# Altium footprint library JEDEC.PcbLib: 40 footprints (part 3 of 3)
Each footprint in its own frame and in the unit in brackets; x right, y up, seen from the top. Pads: shape width x height; smd on the part's side, far side on the other; paste and mask are expansions set on the pad; w line width, h text height; cw(c..) or ccw(c..) is an arc to the next point about the centre after c.
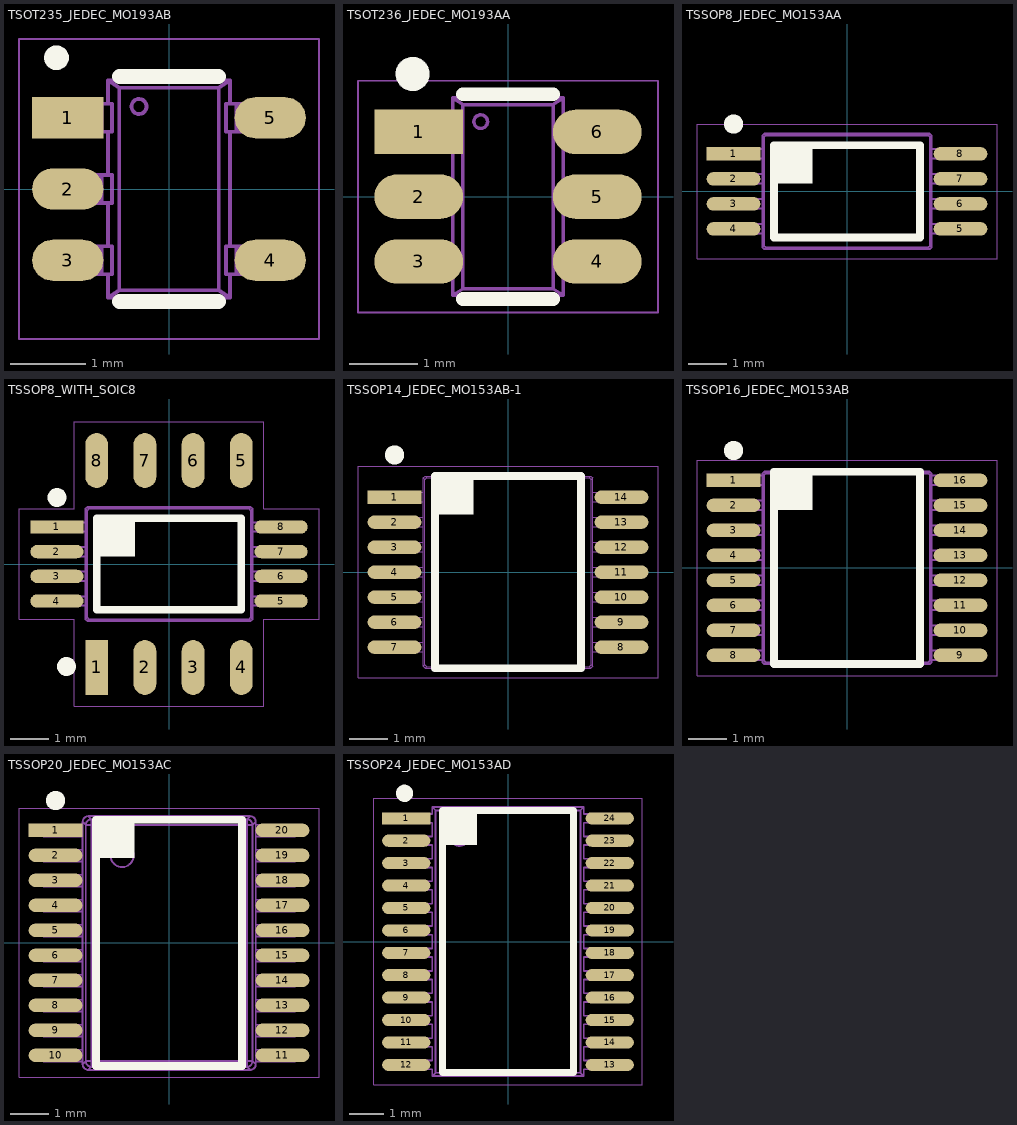
[diagram p2: the footprints below, top view; thin cyan lines are the x and y axes]

## TSOT235_JEDEC_MO193AB [mm] "TSOT23, 5-Leads, Body 1.60x2.90mm, Pitch 0.95mm"
height 0.9
pads (5):
  rect 0.95x0.55 smd paste+0 mask+0.05: 1(-1.35,0.95)
  oval 0.95x0.55 smd paste+0 mask+0.05: 2(-1.35,0) 3(-1.35,-0.95) 4(1.35,-0.95) 5(1.35,0.95)
Top Overlay:
  circle w0.17: c-1.5,1.75 r0.08
  lines w0.2: -0.663,-1.5 0.663,-1.5 ; -0.663,1.5 0.663,1.5
Top Courtyard:
  lines w0.025: -2,-2 -2,2 2,2 2,-2 -2,-2
Top Assembly:
  circle w0.05: c-0.4,1.1 r0.1
  lines w0.05: -0.813,-1.138 -0.813,-1.45 ; -0.813,-0.763 -0.813,-0.188 ; -0.813,0.187 -0.813,0.762 ; -0.813,1.137 -0.813,1.45 ; 0.813,-1.138 0.813,-1.45 ; 0.813,-0.763 0.813,0.762 ; 0.813,1.137 0.813,1.45 ; -1.232,-1.138 -1.213,-1.138 ; -1.232,-1.138 -1.399,-1.138 -1.399,-0.763 -1.232,-0.763 ; -1.232,-1.138 -1.232,-0.763 ; -1.232,-0.763 -1.213,-0.763 ; -1.232,-0.188 -1.213,-0.188 ; -1.232,-0.188 -1.399,-0.188 -1.399,0.187 -1.232,0.187 ; -1.232,-0.188 -1.232,0.187 ; -1.232,0.187 -1.213,0.187 ; -1.232,0.762 -1.213,0.762 ; -1.232,0.762 -1.399,0.762 -1.399,1.137 -1.232,1.137 ; -1.232,0.762 -1.232,1.137 ; -1.232,1.137 -1.213,1.137 ; -1.213,-1.138 -1.058,-1.138 ; -1.213,-1.138 -1.213,-0.763 ; -1.213,-0.763 -1.058,-0.763 ; -1.213,-0.188 -1.058,-0.188 ; -1.213,-0.188 -1.213,0.187 ; -1.213,0.187 -1.058,0.187 ; -1.213,0.762 -1.058,0.762 ; -1.213,0.762 -1.213,1.137 ; -1.213,1.137 -1.058,1.137 ; -1.058,-1.138 -0.898,-1.138 ; -1.058,-1.138 -1.058,-0.763 ; -1.058,-0.763 -0.898,-0.763 ; -1.058,-0.188 -0.898,-0.188 ; -1.058,-0.188 -1.058,0.187 ; -1.058,0.187 -0.898,0.187 ; -1.058,0.762 -0.898,0.762 ; -1.058,0.762 -1.058,1.137 ; -1.058,1.137 -0.898,1.137 ; -0.898,-1.138 -0.76,-1.138 -0.76,-0.763 -0.898,-0.763 ; -0.898,-1.138 -0.898,-0.763 ; -0.898,-0.188 -0.76,-0.188 -0.76,0.187 -0.898,0.187 ; -0.898,-0.188 -0.898,0.187 ; -0.898,0.762 -0.76,0.762 -0.76,1.137 -0.898,1.137 ; -0.898,0.762 -0.898,1.137 ; -0.813,-1.45 -0.663,-1.35 ; -0.813,-1.45 0.813,-1.45 ; -0.813,1.45 -0.663,1.35 ; -0.813,1.45 0.813,1.45 ; -0.663,-1.35 -0.663,1.35 ; -0.663,-1.35 0.663,-1.35 ; -0.663,1.35 0.663,1.35 ; 0.663,-1.35 0.813,-1.45 ; 0.663,-1.35 0.663,1.35 ; 0.663,1.35 0.813,1.45 ; 0.898,-1.138 0.76,-1.138 0.76,-0.763 0.898,-0.763 ; 0.898,-1.138 1.058,-1.138 ; 0.898,-1.138 0.898,-0.763 ; 0.898,-0.763 1.058,-0.763 ; 0.898,0.762 0.76,0.762 0.76,1.137 0.898,1.137 ; 0.898,0.762 1.058,0.762 ; 0.898,0.762 0.898,1.137 ; 0.898,1.137 1.058,1.137 ; 1.058,-1.138 1.213,-1.138 ; 1.058,-1.138 1.058,-0.763 ; 1.058,-0.763 1.213,-0.763 ; 1.058,0.762 1.213,0.762 ; 1.058,0.762 1.058,1.137 ; 1.058,1.137 1.213,1.137 ; 1.213,-1.138 1.232,-1.138 ; 1.213,-1.138 1.213,-0.763 ; 1.213,-0.763 1.232,-0.763 ; 1.213,0.762 1.232,0.762 ; 1.213,0.762 1.213,1.137 ; 1.213,1.137 1.232,1.137 ; 1.232,-1.138 1.399,-1.138 1.399,-0.763 1.232,-0.763 ; 1.232,-1.138 1.232,-0.763 ; 1.232,0.762 1.399,0.762 1.399,1.137 1.232,1.137 ; 1.232,0.762 1.232,1.137
  text ".Designator" at 0.271,-2.704 h1.2
3D body "TSOT235_JEDEC_MO193AB.x_t": height 0.95, standoff 0, extent -1.4,-1.45 1.4,1.45

## TSOT236_JEDEC_MO193AA [mm] "TSOT23, 6-Leads, Body 1.60x2.90mm, Pitch 0.95mm"
height 0.9
pads (6):
  rect 1.3x0.65 smd paste+0 mask+0.05: 1(-1.31,0.95)
  oval 1.3x0.65 smd paste+0 mask+0.05: 2(-1.31,0) 3(-1.31,-0.95) 4(1.31,-0.95) 5(1.31,0) 6(1.31,0.95)
Top Overlay:
  circle w0.25: c-1.4,1.8 r0.125
  lines w0.2: -0.663,-1.5 0.663,-1.5 ; -0.663,1.5 0.663,1.5
Top Courtyard:
  lines w0.025: -2.2,-1.7 2.2,-1.7 2.2,1.7 -2.2,1.7 -2.2,-1.7
Top Assembly:
  circle w0.05: c-0.4,1.1 r0.1
  lines w0.05: -0.813,-1.138 -0.813,-1.45 ; -0.813,-0.763 -0.813,-0.188 ; -0.813,0.187 -0.813,0.762 ; -0.813,1.137 -0.813,1.45 ; 0.813,-1.138 0.813,-1.45 ; 0.813,-0.763 0.813,-0.188 ; 0.813,0.187 0.813,0.762 ; 0.813,1.137 0.813,1.45 ; -1.232,-1.138 -1.232,-0.763 ; -1.232,-1.138 -1.399,-1.138 -1.399,-0.763 -1.232,-0.763 ; -1.232,-1.138 -1.213,-1.138 ; -1.232,-0.763 -1.213,-0.763 ; -1.232,-0.188 -1.232,0.187 ; -1.232,-0.188 -1.399,-0.188 -1.399,0.187 -1.232,0.187 ; -1.232,-0.188 -1.213,-0.188 ; -1.232,0.187 -1.213,0.187 ; -1.232,0.762 -1.232,1.137 ; -1.232,0.762 -1.399,0.762 -1.399,1.137 -1.232,1.137 ; -1.232,0.762 -1.213,0.762 ; -1.232,1.137 -1.213,1.137 ; -1.213,-1.138 -1.213,-0.763 ; -1.213,-1.138 -1.058,-1.138 ; -1.213,-0.763 -1.058,-0.763 ; -1.213,-0.188 -1.213,0.187 ; -1.213,-0.188 -1.058,-0.188 ; -1.213,0.187 -1.058,0.187 ; -1.213,0.762 -1.213,1.137 ; -1.213,0.762 -1.058,0.762 ; -1.213,1.137 -1.058,1.137 ; -1.058,-1.138 -1.058,-0.763 ; -1.058,-1.138 -0.898,-1.138 ; -1.058,-0.763 -0.898,-0.763 ; -1.058,-0.188 -1.058,0.187 ; -1.058,-0.188 -0.898,-0.188 ; -1.058,0.187 -0.898,0.187 ; -1.058,0.762 -1.058,1.137 ; -1.058,0.762 -0.898,0.762 ; -1.058,1.137 -0.898,1.137 ; -0.898,-1.138 -0.898,-0.763 ; -0.898,-1.138 -0.76,-1.138 -0.76,-0.763 -0.898,-0.763 ; -0.898,-0.188 -0.898,0.187 ; -0.898,-0.188 -0.76,-0.188 -0.76,0.187 -0.898,0.187 ; -0.898,0.762 -0.898,1.137 ; -0.898,0.762 -0.76,0.762 -0.76,1.137 -0.898,1.137 ; -0.813,-1.45 0.813,-1.45 ; -0.813,-1.45 -0.663,-1.35 ; -0.813,1.45 0.813,1.45 ; -0.813,1.45 -0.663,1.35 ; -0.663,-1.35 0.663,-1.35 ; -0.663,-1.35 -0.663,1.35 ; -0.663,1.35 0.663,1.35 ; 0.663,-1.35 0.663,1.35 ; 0.663,-1.35 0.813,-1.45 ; 0.663,1.35 0.813,1.45 ; 0.898,-1.138 0.76,-1.138 0.76,-0.763 0.898,-0.763 ; 0.898,-1.138 1.058,-1.138 ; 0.898,-1.138 0.898,-0.763 ; 0.898,-0.763 1.058,-0.763 ; 0.898,-0.188 0.76,-0.188 0.76,0.187 0.898,0.187 ; 0.898,-0.188 1.058,-0.188 ; 0.898,-0.188 0.898,0.187 ; 0.898,0.187 1.058,0.187 ; 0.898,0.762 0.76,0.762 0.76,1.137 0.898,1.137 ; 0.898,0.762 1.058,0.762 ; 0.898,0.762 0.898,1.137 ; 0.898,1.137 1.058,1.137 ; 1.058,-1.138 1.213,-1.138 ; 1.058,-1.138 1.058,-0.763 ; 1.058,-0.763 1.213,-0.763 ; 1.058,-0.188 1.213,-0.188 ; 1.058,-0.188 1.058,0.187 ; 1.058,0.187 1.213,0.187 ; 1.058,0.762 1.213,0.762 ; 1.058,0.762 1.058,1.137 ; 1.058,1.137 1.213,1.137 ; 1.213,-1.138 1.232,-1.138 ; 1.213,-1.138 1.213,-0.763 ; 1.213,-0.763 1.232,-0.763 ; 1.213,-0.188 1.232,-0.188 ; 1.213,-0.188 1.213,0.187 ; 1.213,0.187 1.232,0.187 ; 1.213,0.762 1.232,0.762 ; 1.213,0.762 1.213,1.137 ; 1.213,1.137 1.232,1.137 ; 1.232,-1.138 1.399,-1.138 1.399,-0.763 1.232,-0.763 ; 1.232,-1.138 1.232,-0.763 ; 1.232,-0.188 1.399,-0.188 1.399,0.187 1.232,0.187 ; 1.232,-0.188 1.232,0.187 ; 1.232,0.762 1.399,0.762 1.399,1.137 1.232,1.137 ; 1.232,0.762 1.232,1.137
  text ".Designator" at 0.283,-2.815 h1.25
3D body "TSOT236_JEDEC_MO193AA.x_t": height 0.95, standoff 0, extent -1.4,-1.45 1.4,1.45

## TSSOP8_JEDEC_MO153AA [mm] "TSSOP, 8-Leads, Body 3.0x4.40mm, Pitch 0.65mm"
height 1.2
pads (8):
  rect 1.4x0.35 smd paste+0 mask+0.05: 1(-2.95,0.975)
  oval 1.4x0.35 smd paste+0 mask+0.05: 2(-2.95,0.325) 3(-2.95,-0.325) 4(-2.95,-0.975) 5(2.95,-0.975) 6(2.95,-0.325) 7(2.95,0.325) 8(2.95,0.975)
Top Overlay:
  circle w0.25: c-2.95,1.75 r0.125
  region: -0.9,1.2 -1.9,1.2 -1.9,0.2 -0.9,0.2
  lines w0.2: -1.9,-1.2 -1.9,1.2 1.9,1.2 1.9,-1.2 -1.9,-1.2
Top Courtyard:
  lines w0.025: -3.9,-1.75 -3.9,1.75 3.9,1.75 3.9,-1.75 -3.9,-1.75
Top Assembly:
  circle w0.05: c-1.7,1 r0.25
  lines w0.05: -2.773,-1.098 -2.773,-0.853 ; -2.773,-0.447 -2.773,-0.202 ; -2.773,0.202 -2.773,0.447 ; -2.773,0.853 -2.773,1.098 ; -2.706,-1.098 -2.706,-0.853 ; -2.706,-0.447 -2.706,-0.202 ; -2.706,0.202 -2.706,0.447 ; -2.706,0.853 -2.706,1.098 ; -2.605,-1.098 -2.605,-0.853 ; -2.605,-0.447 -2.605,-0.202 ; -2.605,0.202 -2.605,0.447 ; -2.605,0.853 -2.605,1.098 ; -2.46,-1.098 -2.46,-0.853 ; -2.46,-0.447 -2.46,-0.202 ; -2.46,0.202 -2.46,0.447 ; -2.46,0.853 -2.46,1.098 ; -2.2,-1.449 -2.158,-1.408 ; -2.2,-1.098 -3.2,-1.098 -3.2,-0.853 -2.2,-0.853 ; -2.2,-0.447 -3.2,-0.447 -3.2,-0.202 -2.2,-0.202 ; -2.2,0.202 -3.2,0.202 -3.2,0.447 -2.2,0.447 ; -2.2,0.853 -3.2,0.853 -3.2,1.098 -2.2,1.098 ; -2.149,1.5 -2.108,1.458 ; 2.149,1.5 2.108,1.458 ; 2.2,-1.449 2.158,-1.408 ; 2.2,-1.098 3.2,-1.098 3.2,-0.853 2.2,-0.853 ; 2.2,-0.447 3.2,-0.447 3.2,-0.202 2.2,-0.202 ; 2.2,0.202 3.2,0.202 3.2,0.447 2.2,0.447 ; 2.2,0.853 3.2,0.853 3.2,1.098 2.2,1.098 ; 2.46,-1.098 2.46,-0.853 ; 2.46,-0.447 2.46,-0.202 ; 2.46,0.202 2.46,0.447 ; 2.46,0.853 2.46,1.098 ; 2.605,-1.098 2.605,-0.853 ; 2.605,-0.447 2.605,-0.202 ; 2.605,0.202 2.605,0.447 ; 2.605,0.853 2.605,1.098 ; 2.706,-1.098 2.706,-0.853 ; 2.706,-0.447 2.706,-0.202 ; 2.706,0.202 2.706,0.447 ; 2.706,0.853 2.706,1.098 ; 2.773,-1.098 2.773,-0.853 ; 2.773,-0.447 2.773,-0.202 ; 2.773,0.202 2.773,0.447 ; 2.773,0.853 2.773,1.098 ; -2.2,1.45 -2.158,1.408 ; -2.2,1.45 -2.2,-1.45 -2.15,-1.5 ; -2.2,1.45 -2.15,1.5 2.15,1.5 2.2,1.45 ; -2.158,-1.408 -2.108,-1.458 ; -2.158,-1.408 -2.158,1.408 ; -2.158,1.408 -2.108,1.458 ; -2.15,-1.5 -2.108,-1.458 ; -2.15,-1.5 2.15,-1.5 ; -2.108,-1.458 2.108,-1.458 ; -2.108,1.458 2.108,1.458 ; 2.108,-1.458 2.158,-1.408 ; 2.108,-1.458 2.15,-1.5 ; 2.108,1.458 2.158,1.408 ; 2.15,-1.5 2.2,-1.45 2.2,1.45 ; 2.158,-1.408 2.158,1.408 ; 2.158,1.408 2.2,1.45
  text ".Designator" at -4.511,-0.453 h2
3D body "TSSOP8_JEDEC_MO153.x_t": height 1.2, standoff 0, extent -3.2,-1.5 3.2,1.5

## TSSOP8_WITH_SOIC8 [mm] "TSSOP, 8-Leads, Body 3.0x4.40mm, Pitch 0.65mm"
height 1.2
pads (16):
  rect 1.4x0.35 smd paste+0 mask+0.05: 1(-2.95,0.975)
  rect 0.6x1.45 smd paste+0 mask+0.05: 1(-1.905,-2.725)
  oval 1.4x0.35 smd paste+0 mask+0.05: 2(-2.95,0.325) 3(-2.95,-0.325) 4(-2.95,-0.975) 5(2.95,-0.975) 6(2.95,-0.325) 7(2.95,0.325) 8(2.95,0.975)
  oval 0.6x1.45 smd paste+0 mask+0.05: 2(-0.635,-2.725) 3(0.635,-2.725) 4(1.905,-2.725) 5(1.905,2.725) 6(0.635,2.725) 7(-0.635,2.725) 8(-1.905,2.725)
Top Overlay:
  circle w0.25: c-2.95,1.75 r0.125
  circle w0.25: c-2.7,-2.7 r0.125
  region: -0.9,1.2 -1.9,1.2 -1.9,0.2 -0.9,0.2
  lines w0.2: -1.9,-1.2 1.9,-1.2 1.9,1.2 -1.9,1.2 -1.9,-1.2
Top Courtyard:
  lines w0.025: -3.95,-1.45 -3.95,1.45 -2.5,1.45 -2.5,3.75 2.5,3.75 2.5,1.45 3.95,1.45 3.95,-1.45 2.5,-1.45 2.5,-3.75 -2.5,-3.75 -2.5,-1.45 -3.95,-1.45
Top Assembly:
  circle w0.05: c-1.7,1 r0.25
  lines w0.05: -2.773,-1.098 -2.773,-0.853 ; -2.773,-0.447 -2.773,-0.202 ; -2.773,0.202 -2.773,0.447 ; -2.773,0.853 -2.773,1.098 ; -2.706,-1.098 -2.706,-0.853 ; -2.706,-0.447 -2.706,-0.202 ; -2.706,0.202 -2.706,0.447 ; -2.706,0.853 -2.706,1.098 ; -2.605,-1.098 -2.605,-0.853 ; -2.605,-0.447 -2.605,-0.202 ; -2.605,0.202 -2.605,0.447 ; -2.605,0.853 -2.605,1.098 ; -2.46,-1.098 -2.46,-0.853 ; -2.46,-0.447 -2.46,-0.202 ; -2.46,0.202 -2.46,0.447 ; -2.46,0.853 -2.46,1.098 ; -2.2,-1.449 -2.158,-1.408 ; -2.2,-1.098 -3.2,-1.098 -3.2,-0.853 -2.2,-0.853 ; -2.2,-0.447 -3.2,-0.447 -3.2,-0.202 -2.2,-0.202 ; -2.2,0.202 -3.2,0.202 -3.2,0.447 -2.2,0.447 ; -2.2,0.853 -3.2,0.853 -3.2,1.098 -2.2,1.098 ; -2.149,1.5 -2.108,1.458 ; 2.149,1.5 2.108,1.458 ; 2.2,-1.449 2.158,-1.408 ; 2.2,-1.098 3.2,-1.098 3.2,-0.853 2.2,-0.853 ; 2.2,-0.447 3.2,-0.447 3.2,-0.202 2.2,-0.202 ; 2.2,0.202 3.2,0.202 3.2,0.447 2.2,0.447 ; 2.2,0.853 3.2,0.853 3.2,1.098 2.2,1.098 ; 2.46,-1.098 2.46,-0.853 ; 2.46,-0.447 2.46,-0.202 ; 2.46,0.202 2.46,0.447 ; 2.46,0.853 2.46,1.098 ; 2.605,-1.098 2.605,-0.853 ; 2.605,-0.447 2.605,-0.202 ; 2.605,0.202 2.605,0.447 ; 2.605,0.853 2.605,1.098 ; 2.706,-1.098 2.706,-0.853 ; 2.706,-0.447 2.706,-0.202 ; 2.706,0.202 2.706,0.447 ; 2.706,0.853 2.706,1.098 ; 2.773,-1.098 2.773,-0.853 ; 2.773,-0.447 2.773,-0.202 ; 2.773,0.202 2.773,0.447 ; 2.773,0.853 2.773,1.098 ; -2.2,1.45 -2.15,1.5 2.15,1.5 2.2,1.45 ; -2.2,1.45 -2.2,-1.45 -2.15,-1.5 ; -2.2,1.45 -2.158,1.408 ; -2.158,-1.408 -2.158,1.408 ; -2.158,-1.408 -2.108,-1.458 ; -2.158,1.408 -2.108,1.458 ; -2.15,-1.5 2.15,-1.5 ; -2.15,-1.5 -2.108,-1.458 ; -2.108,-1.458 2.108,-1.458 ; -2.108,1.458 2.108,1.458 ; 2.108,-1.458 2.15,-1.5 ; 2.108,-1.458 2.158,-1.408 ; 2.108,1.458 2.158,1.408 ; 2.15,-1.5 2.2,-1.45 2.2,1.45 ; 2.158,-1.408 2.158,1.408 ; 2.158,1.408 2.2,1.45
  text ".Designator" at -4.511,-0.453 h2
3D body "TSSOP8_JEDEC_MO153.x_t": height 1.2, standoff 0, extent -3.2,-1.5 3.2,1.5

## TSSOP14_JEDEC_MO153AB-1 [mm] "TSSOP, 14-Leads, Body 5.0x4.40mm, Pitch 0.65mm"
height 1.2
pads (14):
  rect 1.4x0.35 smd paste+0 mask+0.05: 1(-2.95,1.95)
  oval 1.4x0.35 smd paste+0 mask+0.05: 2(-2.95,1.3) 3(-2.95,0.65) 4(-2.95,0) 5(-2.95,-0.65) 6(-2.95,-1.3) 7(-2.95,-1.95) 8(2.95,-1.95) 9(2.95,-1.3) 10(2.95,-0.65) 11(2.95,0) 12(2.95,0.65) 13(2.95,1.3) 14(2.95,1.95)
Top Overlay:
  circle w0.25: c-2.95,3.05 r0.125
  region: -0.9,2.5 -1.9,2.5 -1.9,1.5 -0.9,1.5
  lines w0.2: -1.9,-2.5 -1.9,2.5 1.9,2.5 1.9,-2.5 -1.9,-2.5
Top Courtyard:
  lines w0.025: -3.9,-2.75 3.9,-2.75 3.9,2.75 -3.9,2.75 -3.9,-2.75
Top Assembly:
  circle w0.013: c-1.7,2 r0.25
  lines w0.013: -2.773,-2.073 -2.773,-1.828 ; -2.773,-1.423 -2.773,-1.178 ; -2.773,-0.773 -2.773,-0.528 ; -2.773,-0.123 -2.773,0.122 ; -2.773,0.527 -2.773,0.772 ; -2.773,1.177 -2.773,1.422 ; -2.773,1.827 -2.773,2.072 ; -2.706,-2.073 -2.706,-1.828 ; -2.706,-1.423 -2.706,-1.178 ; -2.706,-0.773 -2.706,-0.528 ; -2.706,-0.123 -2.706,0.122 ; -2.706,0.527 -2.706,0.772 ; -2.706,1.177 -2.706,1.422 ; -2.706,1.827 -2.706,2.072 ; -2.605,-2.073 -2.605,-1.828 ; -2.605,-1.423 -2.605,-1.178 ; -2.605,-0.773 -2.605,-0.528 ; -2.605,-0.123 -2.605,0.122 ; -2.605,0.527 -2.605,0.772 ; -2.605,1.177 -2.605,1.422 ; -2.605,1.827 -2.605,2.072 ; -2.46,-2.073 -2.46,-1.828 ; -2.46,-1.423 -2.46,-1.178 ; -2.46,-0.773 -2.46,-0.528 ; -2.46,-0.123 -2.46,0.122 ; -2.46,0.527 -2.46,0.772 ; -2.46,1.177 -2.46,1.422 ; -2.46,1.827 -2.46,2.072 ; -2.2,-2.073 -3.2,-2.073 -3.2,-1.828 -2.2,-1.828 ; -2.2,-1.423 -3.2,-1.423 -3.2,-1.178 -2.2,-1.178 ; -2.2,-0.773 -3.2,-0.773 -3.2,-0.528 -2.2,-0.528 ; -2.2,-0.123 -3.2,-0.123 -3.2,0.122 -2.2,0.122 ; -2.2,0.527 -3.2,0.527 -3.2,0.772 -2.2,0.772 ; -2.2,1.177 -3.2,1.177 -3.2,1.422 -2.2,1.422 ; -2.2,1.827 -3.2,1.827 -3.2,2.072 -2.2,2.072 ; -2.149,2.5 -2.108,2.458 ; 2.149,2.5 2.108,2.458 ; 2.2,-2.073 3.2,-2.073 3.2,-1.828 2.2,-1.828 ; 2.2,-1.423 3.2,-1.423 3.2,-1.178 2.2,-1.178 ; 2.2,-0.773 3.2,-0.773 3.2,-0.528 2.2,-0.528 ; 2.2,-0.123 3.2,-0.123 3.2,0.122 2.2,0.122 ; 2.2,0.527 3.2,0.527 3.2,0.772 2.2,0.772 ; 2.2,1.177 3.2,1.177 3.2,1.422 2.2,1.422 ; 2.2,1.827 3.2,1.827 3.2,2.072 2.2,2.072 ; 2.46,-2.073 2.46,-1.828 ; 2.46,-1.423 2.46,-1.178 ; 2.46,-0.773 2.46,-0.528 ; 2.46,-0.123 2.46,0.122 ; 2.46,0.527 2.46,0.772 ; 2.46,1.177 2.46,1.422 ; 2.46,1.827 2.46,2.072 ; 2.605,-2.073 2.605,-1.828 ; 2.605,-1.423 2.605,-1.178 ; 2.605,-0.773 2.605,-0.528 ; 2.605,-0.123 2.605,0.122 ; 2.605,0.527 2.605,0.772 ; 2.605,1.177 2.605,1.422 ; 2.605,1.827 2.605,2.072 ; 2.706,-2.073 2.706,-1.828 ; 2.706,-1.423 2.706,-1.178 ; 2.706,-0.773 2.706,-0.528 ; 2.706,-0.123 2.706,0.122 ; 2.706,0.527 2.706,0.772 ; 2.706,1.177 2.706,1.422 ; 2.706,1.827 2.706,2.072 ; 2.773,-2.073 2.773,-1.828 ; 2.773,-1.423 2.773,-1.178 ; 2.773,-0.773 2.773,-0.528 ; 2.773,-0.123 2.773,0.122 ; 2.773,0.527 2.773,0.772 ; 2.773,1.177 2.773,1.422 ; 2.773,1.827 2.773,2.072 ; -2.2,-2.45 -2.15,-2.5 ; -2.2,-2.449 -2.158,-2.408 ; -2.2,-2.45 -2.2,2.45 ; -2.2,2.45 -2.15,2.5 2.15,2.5 2.2,2.45 ; -2.2,2.45 -2.158,2.408 ; -2.158,-2.408 -2.158,2.408 ; -2.158,-2.408 -2.108,-2.458 ; -2.158,2.408 -2.108,2.458 ; -2.15,-2.5 2.15,-2.5 ; -2.15,-2.5 -2.108,-2.458 ; -2.108,-2.458 2.108,-2.458 ; -2.108,2.458 2.108,2.458 ; 2.108,-2.458 2.15,-2.5 ; 2.108,-2.458 2.158,-2.408 ; 2.108,2.458 2.158,2.408 ; 2.15,-2.5 2.2,-2.45 ; 2.158,-2.408 2.2,-2.449 ; 2.158,-2.408 2.158,2.408 ; 2.158,2.408 2.2,2.45 ; 2.2,-2.45 2.2,2.45
  text ".Designator" at 0.453,-4.511 h2
3D body "TSSOP14_JEDEC_MO153.x_t": height 1.2, standoff 0, extent -3.2,-2.5 3.2,2.5

## TSSOP16_JEDEC_MO153AB [mm] "TSSOP, 16-Leads, Body 5.0x4.40mm, Pitch 0.65mm"
height 1.2
pads (16):
  rect 1.4x0.35 smd paste+0 mask+0.05: 1(-2.95,2.275)
  oval 1.4x0.35 smd paste+0 mask+0.05: 2(-2.95,1.625) 3(-2.95,0.975) 4(-2.95,0.325) 5(-2.95,-0.325) 6(-2.95,-0.975) 7(-2.95,-1.625) 8(-2.95,-2.275) 9(2.95,-2.275) 10(2.95,-1.625) 11(2.95,-0.975) 12(2.95,-0.325) 13(2.95,0.325) 14(2.95,0.975) 15(2.95,1.625) 16(2.95,2.275)
Top Overlay:
  circle w0.25: c-2.95,3.05 r0.125
  region: -0.9,2.5 -1.9,2.5 -1.9,1.5 -0.9,1.5
  lines w0.2: -1.9,-2.5 1.9,-2.5 1.9,2.5 -1.9,2.5 -1.9,-2.5
Top Courtyard:
  lines w0.025: -3.9,-2.8 3.9,-2.8 3.9,2.8 -3.9,2.8 -3.9,-2.8
Top Assembly:
  drawing of 273 lines, arcs and shapes, not listed
  text ".Designator" at 0.453,-4.511 h2
3D body "TSSOP16_JEDEC_MO153.x_t": height 1.2, standoff 0, extent -3.2,-2.5 3.2,2.5

## TSSOP20_JEDEC_MO153AC [mm] "TSSOP, 20-Leads, Body 6.50x4.40mm, Pitch 0.65mm"
height 1.2
pads (20):
  rect 1.4x0.35 smd paste+0 mask+0.05: 1(-2.95,2.925)
  oval 1.4x0.35 smd paste+0 mask+0.05: 2(-2.95,2.275) 3(-2.95,1.625) 4(-2.95,0.975) 5(-2.95,0.325) 6(-2.95,-0.325) 7(-2.95,-0.975) 8(-2.95,-1.625) 9(-2.95,-2.275) 10(-2.95,-2.925) 11(2.95,-2.925) 12(2.95,-2.275) 13(2.95,-1.625) 14(2.95,-0.975) 15(2.95,-0.325) 16(2.95,0.325) 17(2.95,0.975) 18(2.95,1.625) 19(2.95,2.275) 20(2.95,2.925)
Top Overlay:
  circle w0.25: c-2.95,3.7 r0.125
  region: -0.9,3.2 -1.9,3.2 -1.9,2.2 -0.9,2.2
  lines w0.2: -1.9,-3.2 -1.9,3.2 1.9,3.2 1.9,-3.2 -1.9,-3.2
Top Courtyard:
  lines w0.025: -3.9,-3.5 3.9,-3.5 3.9,3.5 -3.9,3.5 -3.9,-3.5
Top Assembly:
  drawing of 315 lines, arcs and shapes, not listed
  text ".Designator" at 0.339,-3.378 h1.5
3D body "TSSOP20_JEDEC_MO153.x_t": height 1.2, standoff 0, extent -3.2,-3.25 3.2,3.25

## TSSOP24_JEDEC_MO153AD [mm] "TSSOP, 24-Leads, Body 7.8.0x4.40mm, Pitch 0.65mm"
height 1.2
pads (24):
  rect 1.4x0.35 smd paste+0 mask+0.05: 1(-2.95,3.575)
  oval 1.4x0.35 smd paste+0 mask+0.05: 2(-2.95,2.925) 3(-2.95,2.275) 4(-2.95,1.625) 5(-2.95,0.975) 6(-2.95,0.325) 7(-2.95,-0.325) 8(-2.95,-0.975) 9(-2.95,-1.625) 10(-2.95,-2.275) 11(-2.95,-2.925) 12(-2.95,-3.575) 13(2.95,-3.575) 14(2.95,-2.925) 15(2.95,-2.275) 16(2.95,-1.625) 17(2.95,-0.975) 18(2.95,-0.325) 19(2.95,0.325) 20(2.95,0.975) 21(2.95,1.625) 22(2.95,2.275) 23(2.95,2.925) 24(2.95,3.575)
Top Overlay:
  circle w0.25: c-3,4.3 r0.125
  region: -0.9,3.8 -1.9,3.8 -1.9,2.8 -0.9,2.8
  lines w0.2: -1.9,-3.8 1.9,-3.8 1.9,3.8 -1.9,3.8 -1.9,-3.8
Top Courtyard:
  lines w0.025: -3.9,-4.15 3.9,-4.15 3.9,4.15 -3.9,4.15 -3.9,-4.15
Top Assembly:
  drawing of 397 lines, arcs and shapes, not listed
  text ".Designator" at 0.453,-4.511 h2
3D body "TSSOP24_JEDEC_MO153.x_t": height 1.2, standoff 0, extent -3.2,-3.9 3.2,3.9